# Altium footprint library SamacSys.PcbLib: 1008 footprints (part 6 of 63)
Each footprint in its own frame and in the unit in brackets; x right, y up, seen from the top. Pads: shape width x height; smd on the part's side, far side on the other; paste and mask are expansions set on the pad; w line width, h text height; cw(c..) or ccw(c..) is an arc to the next point about the centre after c.
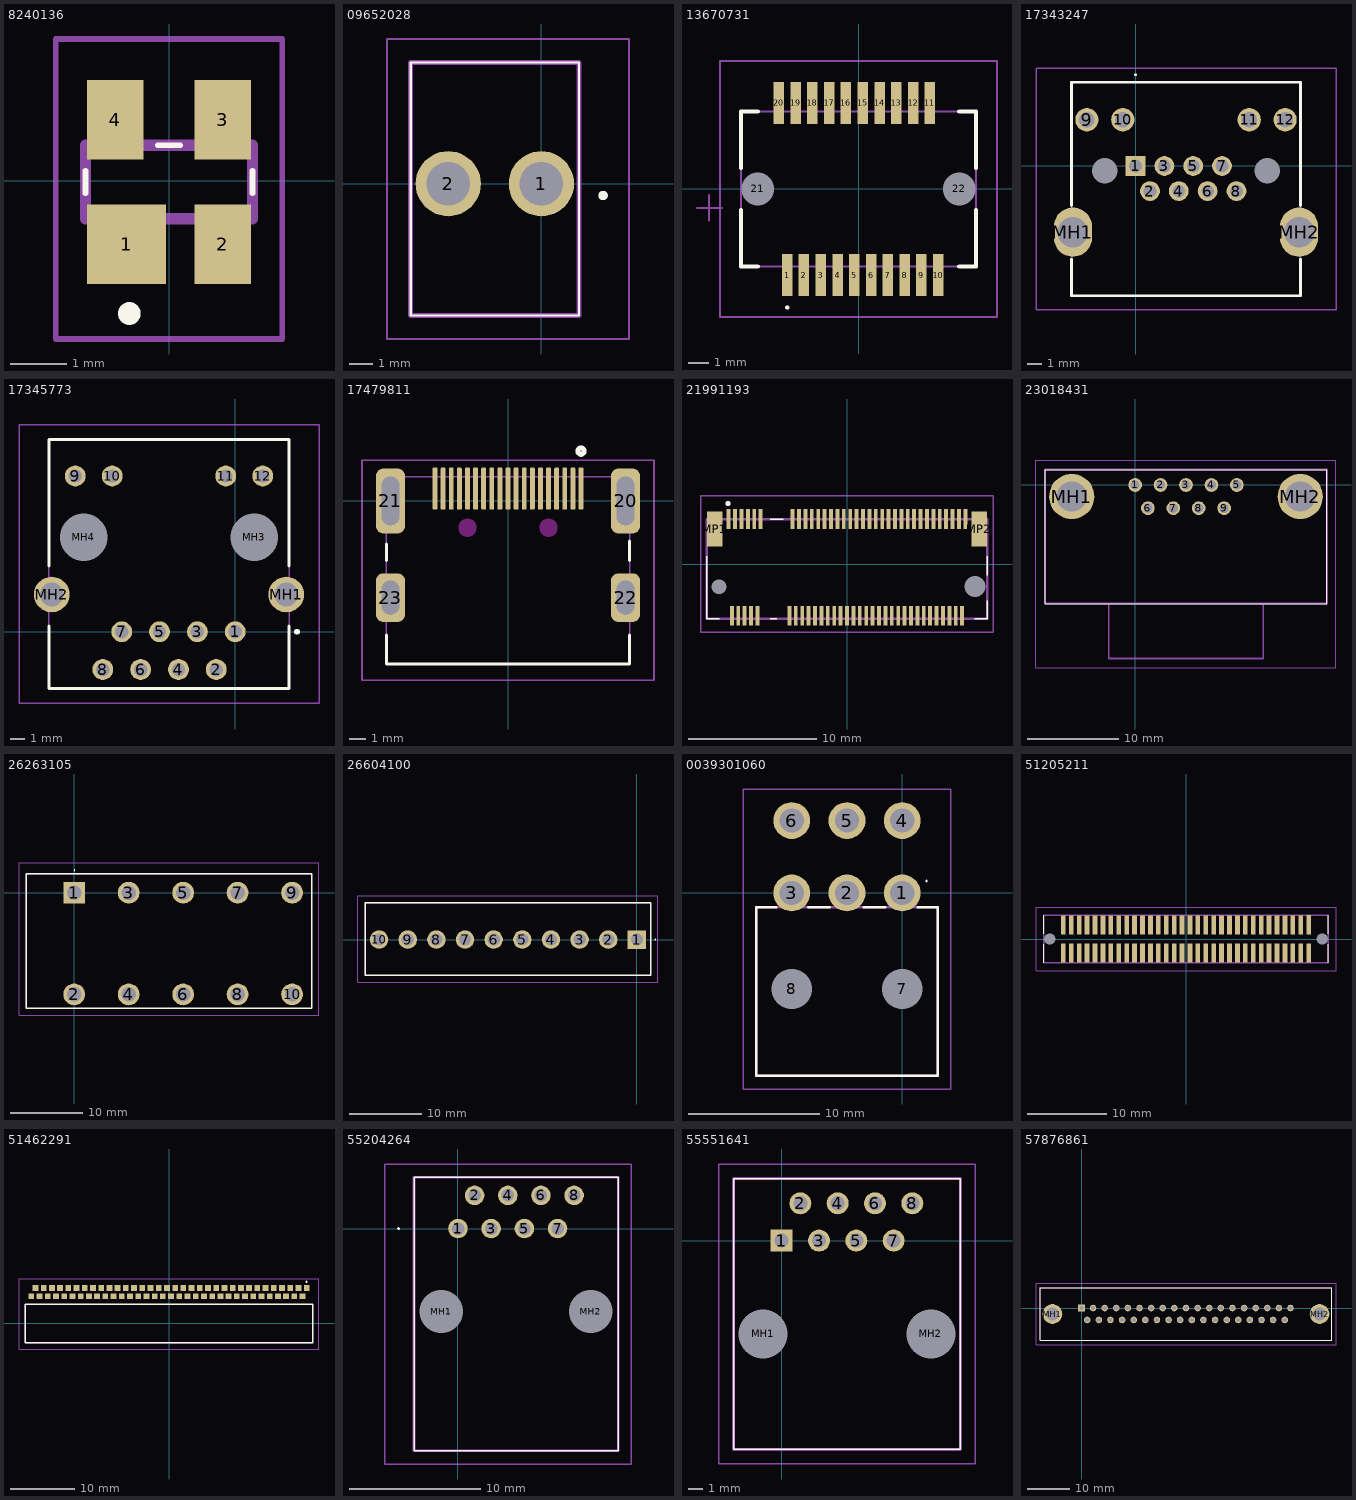
[diagram p5: the footprints below, top view; thin cyan lines are the x and y axes]

## 8240136 [mm]
pads (4):
  rect 1.4x1.4 smd: 1(-0.75,-1.125)
  rect 1x1.4 smd: 2(0.95,-1.125) 3(0.95,1.075) 4(-0.95,1.075)
Top Overlay:
  lines w0.1: -1.475,-0.225 -1.475,0.175 ; -0.2,0.625 0.2,0.625 ; 1.475,-0.225 1.475,0.175
  lines w0.2: -0.8,-2.35 ccw(c-0.7,-2.35) -0.6,-2.35 ccw(c-0.7,-2.35) -0.8,-2.35
Assembly:
  lines w0.2: -1.475,-0.675 -1.475,0.625 1.475,0.625 1.475,-0.675 -1.475,-0.675
Countryard:
  lines w0.1: -2,-2.8 -2,2.5 2,2.5 2,-2.8 -2,-2.8
3D body "8240136.stp": height 1.1, standoff 0, extent -1.475,-1.725 1.475,1.675

## 09652028 [mm]
pads (2):
  round 2.775 hole 1.85: 1(0,0) 2(-3.96,0)
Top Overlay:
  lines w0.1: -5.56,-5.6 -5.56,5.15 1.6,5.15 1.6,-5.6 -5.56,-5.6
  lines w0.2: 2.52,-0.5 cw(c2.62,-0.5) 2.72,-0.5 cw(c2.62,-0.5) 2.52,-0.5
Assembly:
  lines w0.2: -5.56,-5.6 -5.56,5.15 1.6,5.15 1.6,-5.6 -5.56,-5.6
Countryard:
  lines w0.1: -6.56,-6.6 -6.56,6.15 3.72,6.15 3.72,-6.6 -6.56,-6.6
3D body "09-65-2028.stp": height 13.85, standoff -3.6, extent -5.58,-5.6 1.58,5.15

## 13670731 [mm]
pads (22):
  rect 0.5x2 smd: 1(-3.4,-4.1) 2(-2.6,-4.1) 3(-1.8,-4.1) 4(-1,-4.1) 5(-0.2,-4.1) 6(0.6,-4.1) 7(1.4,-4.1) 8(2.2,-4.1) 9(3,-4.1) 10(3.8,-4.1) 11(3.4,4.1) 12(2.6,4.1) 13(1.8,4.1) 14(1,4.1) 15(0.2,4.1) 16(-0.6,4.1) 17(-1.4,4.1) 18(-2.2,4.1) 19(-3,4.1) 20(-3.8,4.1)
  round 0.775 hole 1.55 unplated: 21(-4.8,0) 22(4.8,0)
Top Overlay:
  lines w0.1: -3.4,-5.7 cw(c-3.4,-5.65) -3.4,-5.6 cw(c-3.4,-5.65) -3.4,-5.7
  lines w0.2: -5.6,-1 -5.6,-3.7 -4.8,-3.7 ; -5.6,1 -5.6,3.7 -4.8,3.7 ; 4.8,-3.7 5.6,-3.7 5.6,-1 ; 4.8,3.7 5.6,3.7 5.6,1
Top Assembly:
  lines w0.1: -7.7,-0.9 -6.5,-0.9 ; -7.13,-1.5 -7.13,-0.3
Assembly:
  lines w0.1: -5.6,-3.7 -5.6,3.7 5.6,3.7 5.6,-3.7 -5.6,-3.7
Countryard:
  lines w0.1: -6.6,-6.1 -6.6,6.1 6.6,6.1 6.6,-6.1 -6.6,-6.1
3D body "1367073-1.stp": height 5.16, standoff -0.84, extent -5.5,-4.43 5.5,4.57

## 17343247 [mm]
pads (16):
  rect 1.4x1.4 hole 0.9: 1(0,0)
  round 1.4 hole 0.9: 2(1.02,-1.78) 3(2.04,0) 4(3.06,-1.78) 5(4.08,0) 6(5.1,-1.78) 7(6.12,0) 8(7.14,-1.78)
  round 1.65 hole 1.1: 9(-3.44,3.27) 10(-0.9,3.27) 11(8.04,3.27) 12(10.58,3.27)
  oval 2.7x3.5 hole 2.15: MH1(-4.43,-4.68) MH2(11.57,-4.68)
  round 0.9 hole 1.8 unplated: MH3(-2.17,-0.33) MH4(9.31,-0.33)
Top Overlay:
  lines w0.1: 0,6.4 cw(c0,6.45) 0,6.5 cw(c0,6.45) 0,6.4
  lines w0.2: -4.53,-6.6 -4.53,-9.18 11.67,-9.18 11.67,-6.6 ; -4.53,-2.8 -4.53,5.92 11.67,5.92 11.67,-2.8
Assembly:
  lines w0.1: -4.53,-9.18 -4.53,5.92 11.67,5.92 11.67,-9.18 -4.53,-9.18
Countryard:
  lines w0.1: -7.042,-10.18 -7.042,6.92 14.182,6.92 14.182,-10.18 -7.042,-10.18
3D body "1734324-7.stp": height 10.12, standoff -3.38, extent -4.53,-9.288 11.67,6.05

## 17345773 [mm]
pads (16):
  round 1.4 hole 0.9: 1(0,0) 2(-1.27,-2.54) 3(-2.54,0) 4(-3.81,-2.54) 5(-5.08,0) 6(-6.35,-2.54) 7(-7.62,0) 8(-8.89,-2.54) 9(-10.745,10.46) 10(-8.255,10.46) 11(-0.635,10.46) 12(1.855,10.46)
  round 2.4 hole 1.6: MH1(3.43,2.5) MH2(-12.32,2.5)
  round 1.6 hole 3.2 unplated: MH3(1.27,6.35) MH4(-10.16,6.35)
Top Overlay:
  lines w0.2: -12.52,0.4 -12.52,-3.8 3.63,-3.8 3.63,0.4 ; -12.52,4.4 -12.52,12.9 3.63,12.9 3.63,4.4 ; 4.155,-0.1 ccw(c4.155,0) 4.155,0.1 ccw(c4.155,0) 4.155,-0.1
Assembly:
  lines w0.1: -12.52,-3.8 -12.52,12.9 3.63,12.9 3.63,-3.8 -12.52,-3.8
Countryard:
  lines w0.1: -14.52,-4.8 -14.52,13.9 5.63,13.9 5.63,-4.8 -14.52,-4.8
3D body "1734577-3.stp": height 16.63, standoff -3.36, extent -12.515,-3.8 3.635,12.9

## 17479811 [mm]
pads (23):
  rrect50% 0.3x2.6 smd: 1(4.5,0.76) 2(4,0.76) 3(3.5,0.76) 4(3,0.76) 5(2.5,0.76) 6(2,0.76) 7(1.5,0.76) 8(1,0.76) 9(0.5,0.76) 10(0,0.76) 11(-0.5,0.76) 12(-1,0.76) 13(-1.5,0.76) 14(-2,0.76) 15(-2.5,0.76) 16(-3,0.76) 17(-3.5,0.76) 18(-4,0.76) 19(-4.5,0.76)
  rrect50% 1.8x4 hole 1.1 slot 3 at 90 deg: 20(7.25,0) 21(-7.25,0)
  rrect50% 1.8x3 hole 1.1 slot 2.1 at 90 deg: 22(7.25,-5.96) 23(-7.25,-5.96)
Top Overlay:
  lines w0.2: -7.5,-8.275 -7.5,-10.05 7.5,-10.05 7.5,-8.275 ; -7.5,-3.675 -7.5,-2.675 ; 7.5,-3.675 7.5,-2.475
  lines w0.3: 4.5,2.875 cw(c4.5,3.075) 4.5,3.275 cw(c4.5,3.075) 4.5,2.875
Keep-Out Layer:
  board cut-out: 1.95,-1.65 1.95,-1.759 2.034,-1.962 2.188,-2.116 2.391,-2.2 2.5,-2.2 2.609,-2.2 2.812,-2.116 2.966,-1.962 3.05,-1.759 3.05,-1.65 3.05,-1.541 2.966,-1.338 2.812,-1.184 2.609,-1.1 2.5,-1.1 2.391,-1.1 2.188,-1.184 2.034,-1.338 1.95,-1.541
  board cut-out: -2.5,-2.2 -2.609,-2.2 -2.812,-2.116 -2.966,-1.962 -3.05,-1.759 -3.05,-1.65 -3.05,-1.541 -2.966,-1.338 -2.812,-1.184 -2.609,-1.1 -2.5,-1.1 -2.391,-1.1 -2.188,-1.184 -2.034,-1.338 -1.95,-1.541 -1.95,-1.65 -1.95,-1.759 -2.034,-1.962 -2.188,-2.116 -2.391,-2.2
Assembly:
  lines w0.1: -7.5,-10.05 7.5,-10.05 7.5,1.5 -7.5,1.5 -7.5,-10.05
Countryard:
  lines w0.1: -9,-11.05 9,-11.05 9,2.5 -9,2.5 -9,-11.05
3D body "1747981-1.stp": height 6.15, standoff -2.13, extent -7.5,-9.955 7.5,2.045

## 21991193 [mm]
pads (71):
  rect 0.3x1.55 smd: 1(-9.25,3.506) 2(-9,-4.044) 3(-8.75,3.506) 4(-8.5,-4.044) 5(-8.25,3.506) 6(-8,-4.044) 7(-7.75,3.506) 8(-7.5,-4.044) 9(-7.25,3.506) 10(-7,-4.044) 11(-6.75,3.506) 20(-4.5,-4.044) 21(-4.25,3.506) 22(-4,-4.044) 23(-3.75,3.506) 24(-3.5,-4.044) 25(-3.25,3.506) 26(-3,-4.044) 27(-2.75,3.506) 28(-2.5,-4.044) 29(-2.25,3.506) 30(-2,-4.044) 31(-1.75,3.506) 32(-1.5,-4.044) 33(-1.25,3.506) 34(-1,-4.044) 35(-0.75,3.506) 36(-0.5,-4.044) 37(-0.25,3.506) 38(0,-4.044) 39(0.25,3.506) 40(0.5,-4.044) 41(0.75,3.506) 42(1,-4.044) 43(1.25,3.506) 44(1.5,-4.044) 45(1.75,3.506) 46(2,-4.044) 47(2.25,3.506) 48(2.5,-4.044) 49(2.75,3.506) 50(3,-4.044) 51(3.25,3.506) 52(3.5,-4.044) 53(3.75,3.506) 54(4,-4.044) 55(4.25,3.506) 56(4.5,-4.044) 57(4.75,3.506) 58(5,-4.044) 59(5.25,3.506) 60(5.5,-4.044) 61(5.75,3.506) 62(6,-4.044) 63(6.25,3.506) 64(6.5,-4.044) 65(6.75,3.506) 66(7,-4.044) 67(7.25,3.506) 68(7.5,-4.044) 69(7.75,3.506) 70(8,-4.044) 71(8.25,3.506) 72(8.5,-4.044) 73(8.75,3.506) 74(9,-4.044) 75(9.25,3.506)
  round 0.575 hole 1.15 unplated: MH1(-10,-1.769)
  round 0.825 hole 1.65 unplated: MH2(10,-1.769)
  rect 1.2x2.75 smd: MP1(-10.35,2.731) MP2(10.35,2.731)
Top Overlay:
  lines w0.1: -10.95,0.619 -10.95,-4.269 -10,-4.269 ; -6,-4.269 -5.5,-4.269 ; -6,3.481 -5,3.481 ; 10,-4.269 10.95,-4.269 10.95,-2.881 ; 10.95,-0.881 10.95,0.619
  lines w0.2: -9.4,4.719 cw(c-9.3,4.719) -9.2,4.719 cw(c-9.3,4.719) -9.4,4.719
Assembly:
  lines w0.2: -10.95,-4.269 -10.95,3.481 10.95,3.481 10.95,-4.269 -10.95,-4.269
Countryard:
  lines w0.1: -11.45,-5.319 -11.45,5.319 11.45,5.319 11.45,-5.319 -11.45,-5.319
3D body "2199119-3.stp": height 3.14, standoff -0.49, extent -10.95,-4.67 10.95,4.03

## 23018431 [mm]
pads (11):
  round 1.5 hole 1: 1(0,0) 2(2.78,0) 3(5.56,0) 4(8.34,0) 5(11.12,0) 6(1.39,-2.54) 7(4.17,-2.54) 8(6.95,-2.54) 9(9.73,-2.54)
  round 4.95 hole 3.3: MH1(-6.935,-1.27) MH2(18.055,-1.27)
Top Overlay:
  lines w0.1: -9.845,-12.97 20.965,-12.97 20.965,1.68 -9.845,1.68 -9.845,-12.97
Assembly:
  lines w0.2: -2.89,-12.97 -2.89,-18.97 14.01,-18.97 14.01,-12.97 ; -9.845,-12.97 20.965,-12.97 20.965,1.68 -9.845,1.68 -9.845,-12.97
Countryard:
  lines w0.1: -10.845,-19.97 21.965,-19.97 21.965,2.68 -10.845,2.68 -10.845,-19.97
3D body "2301843-1.stp": height 13.59, standoff -3.79, extent -9.855,-18.95 20.955,1.7

## 26263105 [mm]
pads (10):
  rect 3x3 hole 2: 1(0,0)
  round 3 hole 2: 2(0,-14) 3(7.5,0) 4(7.5,-14) 5(15,0) 6(15,-14) 7(22.5,0) 8(22.5,-14) 9(30,0) 10(30,-14)
Top Overlay:
  lines w0.1: 0,3.1 cw(c0.05,3.1) 0.1,3.1 cw(c0.05,3.1) 0,3.1
  lines w0.2: -6.6,-15.9 -6.6,2.6 32.7,2.6 32.7,-15.9 -6.6,-15.9
Assembly:
  lines w0.1: -6.6,-15.9 -6.6,2.6 32.7,2.6 32.7,-15.9 -6.6,-15.9
Countryard:
  lines w0.1: -7.6,-16.9 -7.6,4.15 33.7,4.15 33.7,-16.9 -7.6,-16.9
3D body "2626-3105.stp": height 23.99, standoff -4.16, extent -6.6,-15.9 32.7,2.6

## 26604100 [mm]
pads (10):
  rect 2.55x2.55 hole 1.7: 1(0,0)
  round 2.55 hole 1.7: 2(-3.96,0) 3(-7.92,0) 4(-11.88,0) 5(-15.84,0) 6(-19.8,0) 7(-23.76,0) 8(-27.72,0) 9(-31.68,0) 10(-35.64,0)
Top Overlay:
  lines w0.1: 2.5,0 cw(c2.55,0) 2.6,0 cw(c2.55,0) 2.5,0
  lines w0.2: -37.555,-4.93 -37.555,5.08 1.915,5.08 1.915,-4.93 -37.555,-4.93
Assembly:
  lines w0.1: -37.555,-4.93 -37.555,5.08 1.915,5.08 1.915,-4.93 -37.555,-4.93
Countryard:
  lines w0.1: -38.555,-5.93 -38.555,6.08 2.915,6.08 2.915,-5.93 -38.555,-5.93
3D body "26-60-4100.stp": height 14.65, standoff -3.64, extent -37.556,-5.113 1.916,4.894

## 0039301060 [mm]
pads (8):
  round 2.8 hole 1.85: 1(0,0) 2(-4.2,0) 3(-8.4,0) 4(0,5.5) 5(-4.2,5.5) 6(-8.4,5.5)
  round 1.525 hole 3.05 unplated: 7(0,-7.3) 8(-8.4,-7.3)
Top Overlay:
  lines w0.092: 1.802,0.913 cw(c1.848,0.913) 1.894,0.913 cw(c1.848,0.913) 1.802,0.913
  lines w0.2: -9.6,-1.1 -11.1,-1.1 -11.1,-13.9 2.7,-13.9 2.7,-1.1 1.2,-1.1 ; -7.13,-1.1 -5.515,-1.1 ; -2.93,-1.1 -1.315,-1.1
Assembly:
  lines w0.2: -11.1,-13.9 -11.1,-1.1 2.7,-1.1 2.7,-13.9 -11.1,-13.9
Countryard:
  lines w0.1: -12.1,-14.9 -12.1,7.9 3.7,7.9 3.7,-14.9 -12.1,-14.9
3D body "0039301060.stp": height 11.4, standoff -3.6, extent -11.3,-13.99 2.897,5.945

## 51205211 [mm]
pads (66):
  rect 0.6x2.4 smd: 1(-15.5,-1.8) 2(-15.5,1.8) 3(-14.5,-1.8) 4(-14.5,1.8) 5(-13.5,-1.8) 6(-13.5,1.8) 7(-12.5,-1.8) 8(-12.5,1.8) 9(-11.5,-1.8) 10(-11.5,1.8) 11(-10.5,-1.8) 12(-10.5,1.8) 13(-9.5,-1.8) 14(-9.5,1.8) 15(-8.5,-1.8) 16(-8.5,1.8) 17(-7.5,-1.8) 18(-7.5,1.8) 19(-6.5,-1.8) 20(-6.5,1.8) 21(-5.5,-1.8) 22(-5.5,1.8) 23(-4.5,-1.8) 24(-4.5,1.8) 25(-3.5,-1.8) 26(-3.5,1.8) 27(-2.5,-1.8) 28(-2.5,1.8) 29(-1.5,-1.8) 30(-1.5,1.8) 31(-0.5,-1.8) 32(-0.5,1.8) 33(0.5,-1.8) 34(0.5,1.8) 35(1.5,-1.8) 36(1.5,1.8) 37(2.5,-1.8) 38(2.5,1.8) 39(3.5,-1.8) 40(3.5,1.8) 41(4.5,-1.8) 42(4.5,1.8) 43(5.5,-1.8) 44(5.5,1.8) 45(6.5,-1.8) 46(6.5,1.8) 47(7.5,-1.8) 48(7.5,1.8) 49(8.5,-1.8) 50(8.5,1.8) 51(9.5,-1.8) 52(9.5,1.8) 53(10.5,-1.8) 54(10.5,1.8) 55(11.5,-1.8) 56(11.5,1.8) 57(12.5,-1.8) 58(12.5,1.8) 59(13.5,-1.8) 60(13.5,1.8) 61(14.5,-1.8) 62(14.5,1.8) 63(15.5,-1.8)
  rect 0.6x2.42 smd: 64(15.5,1.8)
  round 0.725 hole 1.45 unplated: 65(17.2,0) 66(-17.2,0)
Top Overlay:
  lines w0.1: -17.95,-3.025 -17.95,-0.684 ; -17.95,0.684 -17.95,3.025 ; 17.95,-3.025 17.95,-0.684 ; 17.95,0.684 17.95,3.025
Assembly:
  lines w0.2: -17.95,-3.025 -17.95,3.025 17.95,3.025 17.95,-3.025 -17.95,-3.025
Countryard:
  lines w0.1: -18.95,-4.025 18.95,-4.025 18.95,4.025 -18.95,4.025 -18.95,-4.025
3D body "5120521-1.stp": height 5.53, standoff -0.6, extent -17.95,-3.025 17.95,3.025

## 51462291 [mm]
pads (68):
  rect 0.89x0.89 smd: 1(21.27,5.49) 2(20,5.49) 3(18.73,5.49) 4(17.46,5.49) 5(16.19,5.49) 6(14.92,5.49) 7(13.65,5.49) 8(12.38,5.49) 9(11.11,5.49) 10(9.84,5.49) 11(8.57,5.49) 12(7.3,5.49) 13(6.03,5.49) 14(4.76,5.49) 15(3.49,5.49) 16(2.22,5.49) 17(0.95,5.49) 18(-0.32,5.49) 19(-1.59,5.49) 20(-2.86,5.49) 21(-4.13,5.49) 22(-5.4,5.49) 23(-6.67,5.49) 24(-7.94,5.49) 25(-9.21,5.49) 26(-10.48,5.49) 27(-11.75,5.49) 28(-13.02,5.49) 29(-14.29,5.49) 30(-15.56,5.49) 31(-16.83,5.49) 32(-18.1,5.49) 33(-19.37,5.49) 34(-20.64,5.49) 35(20.64,4.22) 36(19.37,4.22) 37(18.1,4.22) 38(16.83,4.22) 39(15.56,4.22) 40(14.29,4.22) 41(13.02,4.22) 42(11.75,4.22) 43(10.48,4.22) 44(9.21,4.22) 45(7.94,4.22) 46(6.67,4.22) 47(5.4,4.22) 48(4.13,4.22) 49(2.86,4.22) 50(1.59,4.22) 51(0.32,4.22) 52(-0.95,4.22) 53(-2.22,4.22) 54(-3.49,4.22) 55(-4.76,4.22) 56(-6.03,4.22) 57(-7.3,4.22) 58(-8.57,4.22) 59(-9.84,4.22) 60(-11.11,4.22) 61(-12.38,4.22) 62(-13.65,4.22) 63(-14.92,4.22) 64(-16.19,4.22) 65(-17.46,4.22) 66(-18.73,4.22) 67(-20,4.22) 68(-21.27,4.22)
Top Overlay:
  lines w0.2: 21.27,6.4 cw(c21.27,6.45) 21.27,6.5 ; 21.27,6.4 ccw(c21.27,6.45) 21.27,6.5 ; 21.27,6.4 cw(c21.27,6.45) 21.27,6.5 ; -22.18,-3 22.18,-3 22.18,3 -22.18,3 -22.18,-3
Assembly:
  lines w0.1: -22.18,-3 22.18,-3 22.18,3 -22.18,3 -22.18,-3
Countryard:
  lines w0.1: -23.18,-4 23.18,-4 23.18,6.935 -23.18,6.935 -23.18,-4

## 55204264 [mm]
pads (10):
  round 1.493 hole 0.96: 1(0,0) 2(1.27,2.54) 3(2.54,0) 4(3.81,2.54) 5(5.08,0) 6(6.35,2.54) 7(7.62,0) 8(8.89,2.54)
  round 1.66 hole 3.32 unplated: MH1(-1.27,-6.35) MH2(10.16,-6.35)
Top Overlay:
  lines w0.1: -4.6,0 ccw(c-4.55,0) -4.5,0 ccw(c-4.55,0) -4.6,0 ; -3.365,-17.02 -3.365,3.94 12.255,3.94 12.255,-17.02 -3.365,-17.02
Assembly:
  lines w0.2: -3.365,-17.02 -3.365,3.94 12.255,3.94 12.255,-17.02 -3.365,-17.02
Countryard:
  lines w0.1: -5.6,-18.02 -5.6,4.94 13.255,4.94 13.255,-18.02 -5.6,-18.02
3D body "5520426-4.stp": height 15.84, standoff -3.97, extent -3.347,-16.92 12.147,3.908

## 55551641 [mm]
pads (10):
  rect 1.493x1.493 hole 0.96: 1(0,0)
  round 1.493 hole 0.96: 2(1.27,2.54) 3(2.54,0) 4(3.81,2.54) 5(5.08,0) 6(6.35,2.54) 7(7.62,0) 8(8.89,2.54)
  round 1.66 hole 3.32 unplated: MH1(-1.27,-6.35) MH2(10.16,-6.35)
Top Overlay:
  lines w0.1: -3.275,-14.205 -3.275,4.215 12.165,4.215 12.165,-14.205 -3.275,-14.205
Assembly:
  lines w0.2: -3.275,-14.205 -3.275,4.215 12.165,4.215 12.165,-14.205 -3.275,-14.205
Countryard:
  lines w0.1: -4.275,-15.205 -4.275,5.215 13.165,5.215 13.165,-15.205 -4.275,-15.205
3D body "5555164-1.stp": height 12.09, standoff -4.3, extent -3.208,-14.4 12.108,3.761

## 57876861 [mm]
pads (39):
  rect 1.56x1.56 hole 1.04: 1(0,0)
  round 1.56 hole 1.04: 2(2.74,0) 3(5.51,0) 4(8.28,0) 5(11.02,0) 6(13.79,0) 7(16.56,0) 8(19.3,0) 9(22.07,0) 10(24.84,0) 11(27.61,0) 12(30.38,0) 13(33.12,0) 14(35.89,0) 15(38.66,0) 16(41.4,0) 17(44.17,0) 18(46.94,0) 19(49.68,0) 20(1.37,-2.84) 21(4.14,-2.84) 22(6.88,-2.84) 23(9.65,-2.84) 24(12.42,-2.84) 25(15.16,-2.84) 26(17.93,-2.84) 27(20.7,-2.84) 28(23.44,-2.84) 29(26.24,-2.84) 30(28.98,-2.84) 31(31.75,-2.84) 32(34.52,-2.84) 33(37.26,-2.84) 34(40.03,-2.84) 35(42.8,-2.84) 36(45.54,-2.84) 37(48.31,-2.84)
  round 4.68 hole 3.12: MH1(-6.91,-1.42) MH2(56.59,-1.42)
Top Overlay:
  lines w0.1: -9.82,-7.695 59.5,-7.695 59.5,4.855 -9.82,4.855 -9.82,-7.695
Assembly:
  lines w0.2: -9.82,-7.695 59.5,-7.695 59.5,4.855 -9.82,4.855 -9.82,-7.695
Countryard:
  lines w0.1: -10.82,-8.695 60.5,-8.695 60.5,5.855 -10.82,5.855 -10.82,-8.695
3D body "5787686-1.stp": height 12.46, standoff -3.44, extent -9.856,-7.719 59.536,4.879